# EAGLE library part 6100XX21121_61002221121 (library WR-PHD)
WR-PHD 2.54 mm SMT Dual Pin Header ARTICLE PROPERTIES: Pins:4;​ 6;​ 8;​ 10;​ 12;​ 14;​ 16;​ 20;​ 22;​ 24;​ 26;​ 32;​ 34;​ 36 KIND PROPERTIES: Pitch：2.54 mm Quality Class:3 as per CECC 75 301-802 Rows：Dual Gender：Pin Header Type：Straight MATERIAL PROPERTIES: Insulator Material :PA6T Insulator Flammability Rating:UL94 V-0 Contact Material:Copper Alloy Contact Plating:Gold Contact Type:Stamped GENERAL INFORMATION Operating Temperature:-40 up to +125 °C Compliance:Lead free / RoHS ELECTRICAL PROPERTIES: Rated Current:3 A IR 1:3 A Withstanding Voltage:500 V (AC) Contact Resistance:20 mΩ RISO:1000 MΩ CERTIFICATION UL Approval:E323964 PACKAGING PROPERTIES Packaging:Tube <https://katalog.we-online.com/media/images/v2/o33205v209%20Family_WR-PHD_610xxx21121.jpg> Details see: https://katalog.we-online.com/en/em/PHD_2_54_SMT_DUAL_PIN_HEADER_6100XX21121 Updated by Yingchun,Shan 2019-10-18 2019 (C) Würth Elektronik
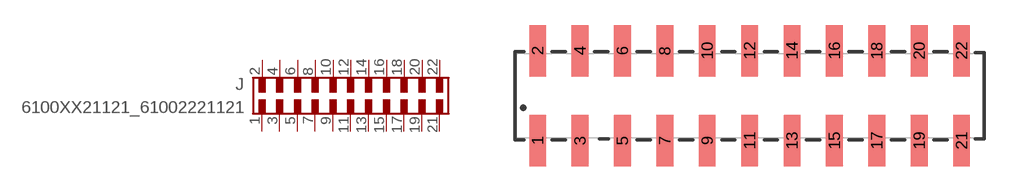
[diagram p100: symbol with the pads of 61002221121; footprint 61002221121]

Designator prefix J

## 6100XX21121_61002221121 (DATASHEET-URL: https://www.we-online.com/redexpert/spec/61002221121?ae; GENDER: Pin Header; IR: 3A; MOUNT: SMT; PACKAGING: Tube; PART-NUMBER: 61002221121; PINS: 22; PITCH: 2.54 mm; ROWS: Dual; TYPE: Straight; VALUE: 61002221121)  [61002221121]
1  1  pas
2  2  pas
3  3  pas
4  4  pas
5  5  pas
6  6  pas
7  7  pas
8  8  pas
9  9  pas
10  10  pas
11  11  pas
12  12  pas
13  13  pas
14  14  pas
15  15  pas
16  16  pas
17  17  pas
18  18  pas
19  19  pas
20  20  pas
21  21  pas
22  22  pas

## Footprint 61002221121 (pad centres in mm)
WR-PHD 2.54 mm SMT Dual Pin Header, 22 Pins
smd 1 x 3.1: 1 -12.7,-2.7; 2 -12.7,2.7; 3 -10.16,-2.7; 4 -10.16,2.7; 5 -7.62,-2.7; 6 -7.62,2.7; 7 -5.08,-2.7; 8 -5.08,2.7; 9 -2.54,-2.7; 10 -2.54,2.7; 11 0,-2.7; 12 0,2.7; 13 2.54,-2.7; 14 2.54,2.7; 15 5.08,-2.7; 16 5.08,2.7; 17 7.62,-2.7; 18 7.62,2.7; 19 10.16,-2.7; 20 10.16,2.7; 21 12.7,-2.7; 22 12.7,2.7